# Altium footprint library cp-01.PcbLib: 47 footprints (part 2 of 3)
Each footprint in its own frame and in the unit in brackets; x right, y up, seen from the top. Pads: shape width x height; smd on the part's side, far side on the other; paste and mask are expansions set on the pad; w line width, h text height; cw(c..) or ccw(c..) is an arc to the next point about the centre after c.
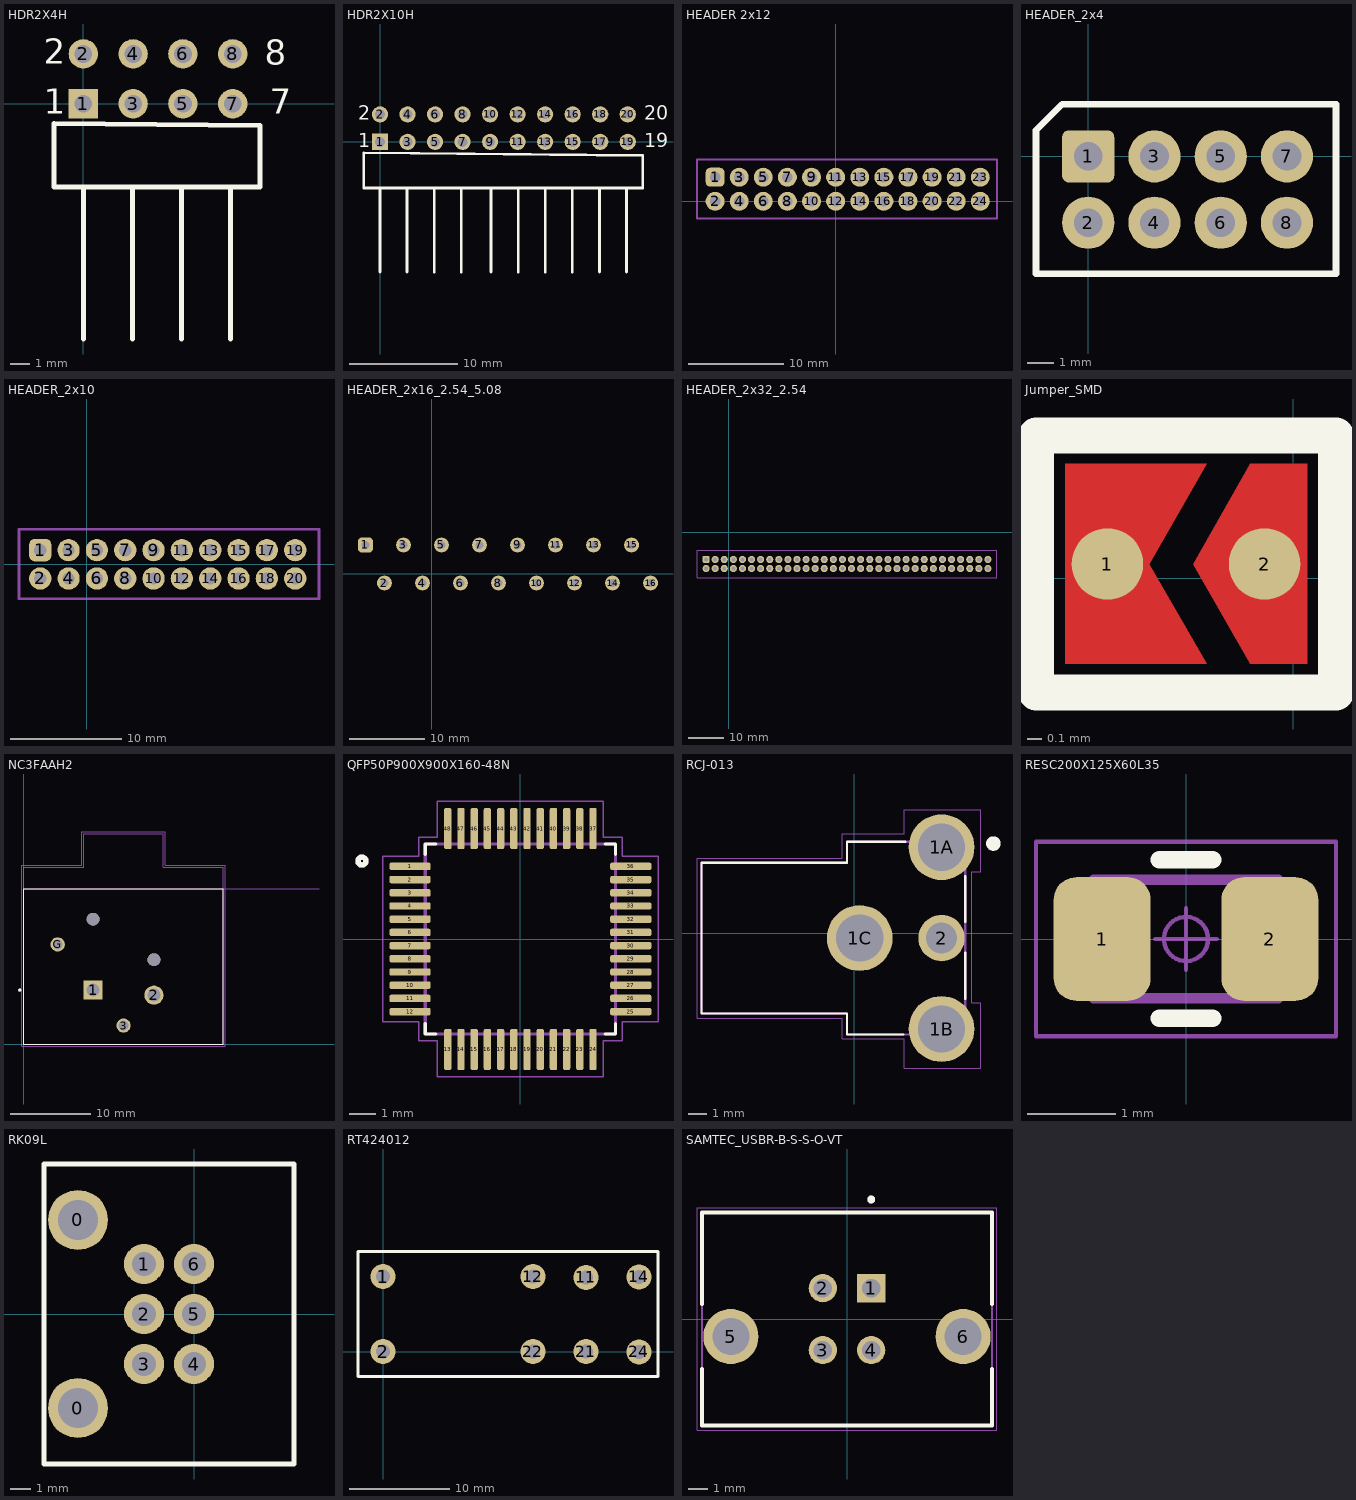
[diagram p1: the footprints below, top view; thin cyan lines are the x and y axes]

## HDR2X4H [mm] "Connector; Header; 10x2 Position; Right Angle"
pads (8):
  rect 1.5x1.5 hole 0.9: 1(0,0)
  round 1.5 hole 0.9: 2(0,2.54) 3(2.54,0) 4(2.54,2.54) 5(5.08,0) 6(5.08,2.54) 7(7.62,0) 8(7.62,2.54)
Top Overlay:
  lines w0.254: 0,-12 0,-4.25 ; 2.5,-12 2.5,-4.25 ; 5,-12 5,-4.25 ; 7.5,-12 7.5,-4.25 ; -1.5,-4.25 -1.5,-1 9,-1.102 9,-4.25 -1.5,-4.25
  text "8" at 9.25,2 h1.27
  text "7" at 9.5,-0.5 h1.27
  text "2" at -2.032,2.032 h1.27
  text "1" at -2.032,-0.508 h1.27
3D body "2x4 Male Pin Header Angle.STEP": height 2.5, standoff -5.5, extent -1.265,-12.05 8.9,2.85

## HDR2X10H [mm] "Connector; Header; 10x2 Position; Right Angle"
pads (20):
  rect 1.5x1.5 hole 0.9: 1(0,0)
  round 1.5 hole 0.9: 2(0,2.54) 3(2.54,0) 4(2.54,2.54) 5(5.08,0) 6(5.08,2.54) 7(7.62,0) 8(7.62,2.54) 9(10.16,0) 10(10.16,2.54) 11(12.7,0) 12(12.7,2.54) 13(15.24,0) 14(15.24,2.54) 15(17.78,0) 16(17.78,2.54) 17(20.32,0) 18(20.32,2.54) 19(22.86,0) 20(22.86,2.54)
Top Overlay:
  lines w0.254: 0,-12 0,-4.25 ; 2.5,-12 2.5,-4.25 ; 5,-12 5,-4.25 ; 7.5,-12 7.5,-4.25 ; 10.25,-12 10.25,-4.25 ; 12.75,-12 12.75,-4.25 ; 15.25,-12 15.25,-4.25 ; 17.75,-12 17.75,-4.25 ; 20.25,-12 20.25,-4.25 ; 22.75,-12 22.75,-4.25 ; -1.5,-4.25 18.25,-4.25 24.25,-4.25 24.25,-1.25 -1.5,-1 -1.5,-4.25
  text "20" at 24.384,2.032 h1.27
  text "19" at 24.384,-0.508 h1.27
  text "2" at -2.032,2.032 h1.27
  text "1" at -2.032,-0.508 h1.27
3D body "2x10 Male Pin Header Angle.STEP": height 5.2, standoff -2.8, extent -1.303,-12.075 24.103,2.825

## HEADER 2x12 [mm]
pads (24):
  rrect50% 2x2 hole 1.1 paste-1.65: 1(-12.7,2.54)
  round 2 hole 1.1 paste-1.65: 2(-12.7,0) 3(-10.16,2.54) 4(-10.16,0) 5(-7.62,2.54) 6(-7.62,0) 7(-5.08,2.54) 8(-5.08,0) 9(-2.54,2.54) 10(-2.54,0) 11(0,2.54) 12(0,0) 13(2.54,2.54) 14(2.54,0) 15(5.08,2.54) 16(5.08,0) 17(7.62,2.54) 18(7.62,0) 19(10.16,2.54) 20(10.16,0) 21(12.7,2.54) 22(12.7,0) 23(15.24,2.54) 24(15.24,0)
Top Assembly:
  lines w0.254: -14.606,-1.813 17,-1.813 17,4.412 -14.606,4.412 -14.606,-1.813

## HEADER_2x4 [mm]
pads (8):
  rrect25% 2x2 hole 1.1 paste-2: 1(0,0)
  round 2 hole 1.1 paste-2: 2(0,-2.54) 3(2.54,0) 4(2.54,-2.54) 5(5.08,0) 6(5.08,-2.54) 7(7.62,0) 8(7.62,-2.54)
Top Overlay:
  lines w0.254: -2,-4.5 -2,1 -1,2 -0.5,2 9.5,2 9.5,-4.5 -2,-4.5
3D body "PHT-104-01-L-D.stp": height 8.38, standoff -3.1, extent -1.28,-3.815 8.88,1.215

## HEADER_2x10 [mm]
pads (20):
  rrect50% 2x2 hole 1.1 paste-1.65: 1(-4.169,1.253)
  round 2 hole 1.1 paste-1.65: 2(-4.169,-1.287) 3(-1.629,1.253) 4(-1.629,-1.287) 5(0.911,1.253) 6(0.911,-1.287) 7(3.451,1.253) 8(3.451,-1.287) 9(5.991,1.253) 10(5.991,-1.287) 11(8.531,1.253) 12(8.531,-1.287) 13(11.071,1.253) 14(11.071,-1.287) 15(13.611,1.253) 16(13.611,-1.287) 17(16.151,1.253) 18(16.151,-1.287) 19(18.691,1.253) 20(18.691,-1.287)
Top Assembly:
  lines w0.254: -6.075,-3.1 20.825,-3.1 20.825,3.125 -6.075,3.125 -6.075,-3.1
Mechanical 13:
  text "X" at 7.685,62.052 h7.98
  text "3" at 11.248,62.052 h7.98
  text "X" at 7.81,61.452 h7.98
  text "3" at 11.373,61.452 h7.98
3D body "header 2x10.stp": height 12.76, standoff -5.78, extent -5.425,-2.465 19.975,2.615

## HEADER_2x16_2.54_5.08 [mm]
pads (16):
  rrect50% 2x2 hole 1.1 paste-1.65: 1(-8.89,3.81)
  round 2 hole 1.1 paste-1.65: 2(-6.35,-1.27) 3(-3.81,3.81) 4(-1.27,-1.27) 5(1.27,3.81) 6(3.81,-1.27) 7(6.35,3.81) 8(8.89,-1.27) 9(11.43,3.81) 10(13.97,-1.27) 11(16.51,3.81) 12(19.05,-1.27) 13(21.59,3.81) 14(24.13,-1.27) 15(26.67,3.81) 16(29.21,-1.27)

## HEADER_2x32_2.54 [mm]
pads (64):
  rrect50% 2x2 hole 1.1 paste-1.65: 1(-6.35,-7.62)
  round 2 hole 1.1 paste-1.65: 2(-6.35,-10.16) 3(-3.81,-7.62) 4(-3.81,-10.16) 5(-1.27,-7.62) 6(-1.27,-10.16) 7(1.27,-7.62) 8(1.27,-10.16) 9(3.81,-7.62) 10(3.81,-10.16) 11(6.35,-7.62) 12(6.35,-10.16) 13(8.89,-7.62) 14(8.89,-10.16) 15(11.43,-7.62) 16(11.43,-10.16) 17(13.97,-7.62) 18(13.97,-10.16) 19(16.51,-7.62) 20(16.51,-10.16) 21(19.05,-7.62) 22(19.05,-10.16) 23(21.59,-7.62) 24(21.59,-10.16) 25(24.13,-7.62) 26(24.13,-10.16) 27(26.67,-7.62) 28(26.67,-10.16) 29(29.21,-7.62) 30(29.21,-10.16) 31(31.75,-7.62) 32(31.75,-10.16) 33(34.29,-7.62) 34(34.29,-10.16) 35(36.83,-7.62) 36(36.83,-10.16) 37(39.37,-7.62) 38(39.37,-10.16) 39(41.91,-7.62) 40(41.91,-10.16) 41(44.45,-7.62) 42(44.45,-10.16) 43(46.99,-7.62) 44(46.99,-10.16) 45(49.53,-7.62) 46(49.53,-10.16) 47(52.07,-7.62) 48(52.07,-10.16) 49(54.61,-7.62) 50(54.61,-10.16) 51(57.15,-7.62) 52(57.15,-10.16) 53(59.69,-7.62) 54(59.69,-10.16) 55(62.23,-7.62) 56(62.23,-10.16) 57(64.77,-7.62) 58(64.77,-10.16) 59(67.31,-7.62) 60(67.31,-10.16) 61(69.85,-7.62) 62(69.85,-10.16) 63(72.39,-7.62) 64(72.39,-10.16)
Top Assembly:
  lines w0.254: -8.89,-12.7 74.93,-12.7 74.93,-5.08 -8.89,-5.08 -8.89,-12.7

## Jumper_SMD [mm]
pads (2):
  round 0.5 smd: 1(-1.3,0.1) 2(-0.2,0.1)
Top Layer:
  region: -0.3,-0.6 -0.7,0.1 -0.3,0.8 0.1,0.8 0.1,-0.6
  region: -1.594,0.8 -1.594,-0.6 -0.606,-0.6 -1.006,0.1 -0.606,0.8
Top Overlay:
  lines w0.254: -1.8,-0.8 0.3,-0.8 0.3,1 -1.8,1 -1.8,-0.8
Top Solder:
  rectangle: -1.7,-0.7 0.2,0.9

## NC3FAAH2 [mm]
pads (6):
  rect 2.4x2.4 / inner round 2.4 / far side rect 2.4x2.4 hole 1.6: 1(8.69,6.8)
  round 2.4 hole 1.6: 2(16.31,6.165)
  round 1.8 hole 1.2: 3(12.5,2.355) G(4.245,12.515)
  round 1.6 hole 1.6 unplated: ""(8.69,15.69) ""(16.31,10.61)
Top Overlay:
  circle w0.2: c-0.5,6.8 r0.1
  lines w0.127: 0,0 25,0 25,19.5 0,19.5 0,0
Mechanical 13:
  circle w0.2: c-0.5,6.8 r0.1
  lines w0.127: 37,19.5 0,19.5 ; 0,19.5 0,0 25,0 25,22.2 17.5,22.2 17.5,26.4 7.5,26.4 7.5,22.2 0,22.2 0,19.5
  text "PANEL EDGE" at 25.5,20 h1.27
Mechanical 15:
  lines w0.05: -0.25,-0.25 -0.25,22.45 7.25,22.45 7.25,26.65 17.75,26.65 17.75,22.45 25.25,22.45 25.25,-0.25 -0.25,-0.25
3D body "NC3FAAH2--3DModel-STEP-269445.STEP": height 29.65, standoff -3, extent 0,-0.2 25.344,26.2

## PCBComponent_1 - duplicate [mm]

## QFP50P900X900X160-48N [mm]
pads (48):
  rrect50% 1.56x0.28 smd: 1(-4.18,2.75) 2(-4.18,2.25) 3(-4.18,1.75) 4(-4.18,1.25) 5(-4.18,0.75) 6(-4.18,0.25) 7(-4.18,-0.25) 8(-4.18,-0.75) 9(-4.18,-1.25) 10(-4.18,-1.75) 11(-4.18,-2.25) 12(-4.18,-2.75) 25(4.18,-2.75) 26(4.18,-2.25) 27(4.18,-1.75) 28(4.18,-1.25) 29(4.18,-0.75) 30(4.18,-0.25) 31(4.18,0.25) 32(4.18,0.75) 33(4.18,1.25) 34(4.18,1.75) 35(4.18,2.25) 36(4.18,2.75)
  rrect50% 0.28x1.56 smd: 13(-2.75,-4.18) 14(-2.25,-4.18) 15(-1.75,-4.18) 16(-1.25,-4.18) 17(-0.75,-4.18) 18(-0.25,-4.18) 19(0.25,-4.18) 20(0.75,-4.18) 21(1.25,-4.18) 22(1.75,-4.18) 23(2.25,-4.18) 24(2.75,-4.18) 37(2.75,4.18) 38(2.25,4.18) 39(1.75,4.18) 40(1.25,4.18) 41(0.75,4.18) 42(0.25,4.18) 43(-0.25,4.18) 44(-0.75,4.18) 45(-1.25,4.18) 46(-1.75,4.18) 47(-2.25,4.18) 48(-2.75,4.18)
Top Overlay:
  circle w0.2: c-6,2.95 r0.15
  lines w0.127: -3.6,-3.21 -3.6,-3.6 -3.21,-3.6 ; -3.6,3.21 -3.6,3.6 -3.21,3.6 ; 3.21,-3.6 3.6,-3.6 3.6,-3.21 ; 3.21,3.6 3.6,3.6 3.6,3.21
Mechanical 13:
  circle w0.2: c-6,2.95 r0.15
  lines w0.127: -3.6,-3.6 -3.6,3.6 3.6,3.6 3.6,-3.6 -3.6,-3.6
Mechanical 15:
  lines w0.05: -5.21,-3.14 -5.21,3.14 -3.85,3.14 -3.85,3.85 -3.14,3.85 -3.14,5.21 3.14,5.21 3.14,3.85 3.85,3.85 3.85,3.14 5.21,3.14 5.21,-3.14 3.85,-3.14 3.85,-3.85 3.14,-3.85 3.14,-5.21 -3.14,-5.21 -3.14,-3.85 -3.85,-3.85 -3.85,-3.14 -5.21,-3.14
3D body "stm32f103c8t6.stp": height 1.48, standoff 0, extent -4.5,-4.5 4.5,4.5

## RCJ-013 [mm]
pads (4):
  round 3.616 hole 2.6: 1A(4.807,4.746) 1B(4.807,-5.254) 1C(0.307,-0.254)
  round 2.55 hole 1.7: 2(4.807,-0.254)
Top Overlay:
  circle w0.4: c7.657,4.946 r0.2
  lines w0.127: 2.707,-5.554 -0.393,-5.554 -0.393,-4.404 -8.393,-4.404 -8.393,3.896 -0.393,3.896 -0.393,5.046 2.807,5.046 ; 6.107,-3.604 6.107,-1.054 ; 6.107,0.646 6.107,3.146
Mechanical 13:
  lines w0.127: -8.393,-4.404 -0.393,-4.404 -0.393,-5.554 6.107,-5.554 6.107,5.046 -0.393,5.046 -0.393,3.896 -8.393,3.896 -8.393,-4.404
Mechanical 15:
  lines w0.05: -8.643,-4.654 -0.643,-4.654 -0.643,-5.804 2.757,-5.804 2.757,-7.404 6.957,-7.404 6.957,-3.804 6.457,-3.804 6.457,3.396 6.957,3.396 6.957,6.796 2.757,6.796 2.757,5.496 -0.643,5.496 -0.643,4.146 -8.643,4.146 -8.643,-4.654

## RESC200X125X60L35 [mm] "Resistor, Chip; 2.00 mm L X 1.25 mm W X 0.60 mm H body"
height 0.6
pads (2):
  rrect46% 1.1x1.4 smd: 1(-0.95,0) 2(0.95,0)
Top Overlay:
  lines w0.2: -0.3,-0.9 0.3,-0.9 ; -0.3,0.9 0.3,0.9
Top Courtyard:
  circle w0.05: c0,0 r0.25
  lines w0.05: -0.35,0 0.35,0 ; 0,-0.35 0,0.35 ; -1.7,-1.1 1.7,-1.1 1.7,1.1 -1.7,1.1 -1.7,-1.1
Top Assembly:
  lines w0.1: -1.05,-0.68 -1.05,0.68 1.05,0.68 1.05,-0.68 -1.05,-0.68
Top Component Outline:
  lines w0.025: -1,-0.625 -1,0.625 1,0.625 1,-0.625 -1,-0.625
Top Designator:
  text ".Designator" at -4.511,-0.453 h2
Mechanical 25:
  lines w0.025: -1,-0.625 -0.5,-0.625 -0.5,0.625 -1,0.625 -1,-0.625 ; 0.5,-0.625 0.5,0.625 1,0.625 1,-0.625 0.5,-0.625
3D body "RESC200X125X60X35.stp": height 0.6, standoff 0, extent -1,-0.625 1,0.625

## RK09L [mm]
pads (8):
  round 3 hole 2: 0(-5.8,-4.7) 0(-5.8,4.7)
  round 2 hole 1.2: 1(-2.5,2.5) 2(-2.5,0) 3(-2.5,-2.5) 4(0,-2.5) 5(0,0) 6(0,2.5)
Top Overlay:
  lines w0.254: -7.5,-7.5 5,-7.5 5,0 5,7.5 -7.5,7.5 -7.5,-7.5
3D body "rk09l12b0a31.stp": height 11.85, standoff -3.05, extent -7.3,-6.05 20.1,6.05

## RT424012 [mm]
pads (8):
  round 2.5 hole 1.4: 1(0,7.5) 2(0,0) 11(20.3,7.4) 12(15,7.5) 14(25.6,7.45) 21(20.3,0) 22(15,0) 24(25.6,-0.05)
Top Overlay:
  lines w0.254: -2.5,-2.5 27.5,-2.5 27.5,10 -2.5,10 -2.5,-2.5
3D body "c-2-1393237-8-c-3d.stp": height 15.8, standoff -3.5, extent -2.3,-2.65 26.7,10.05

## SAMTEC_USBR-B-S-S-O-VT [mm]
pads (6):
  rect 1.458x1.458 hole 0.95: 1(1.25,1.6)
  round 1.458 hole 0.95: 2(-1.25,1.6) 3(-1.25,-1.6) 4(1.25,-1.6)
  round 2.85 hole 1.9: 5(-6,-0.9) 6(6,-0.9)
Top Overlay:
  circle w0.2: c1.25,6.18 r0.1
  lines w0.2: -7.5,-2.58 -7.5,-5.5 7.5,-5.5 7.5,-2.58 ; -7.5,0.78 -7.5,5.5 7.5,5.5 7.5,0.78
Mechanical 13:
  circle w0.2: c1.25,6.18 r0.1
  lines w0.1: -7.5,-5.5 -7.5,5.5 7.5,5.5 7.5,-5.5 -7.5,-5.5
Mechanical 15:
  lines w0.05: -7.75,-5.75 -7.75,5.75 7.75,5.75 7.75,-5.75 -7.75,-5.75
3D body "USBR-B-S-S-O-VT.stp": height 15.97, standoff -5.31, extent -7.519,-5.412 7.519,5.588